# Altium footprint library WR-MJ.PcbLib: 101 footprints (part 2 of 7)
Each footprint in its own frame and in the unit in brackets; x right, y up, seen from the top. Pads: shape width x height; smd on the part's side, far side on the other; paste and mask are expansions set on the pad; w line width, h text height; cw(c..) or ccw(c..) is an arc to the next point about the centre after c.
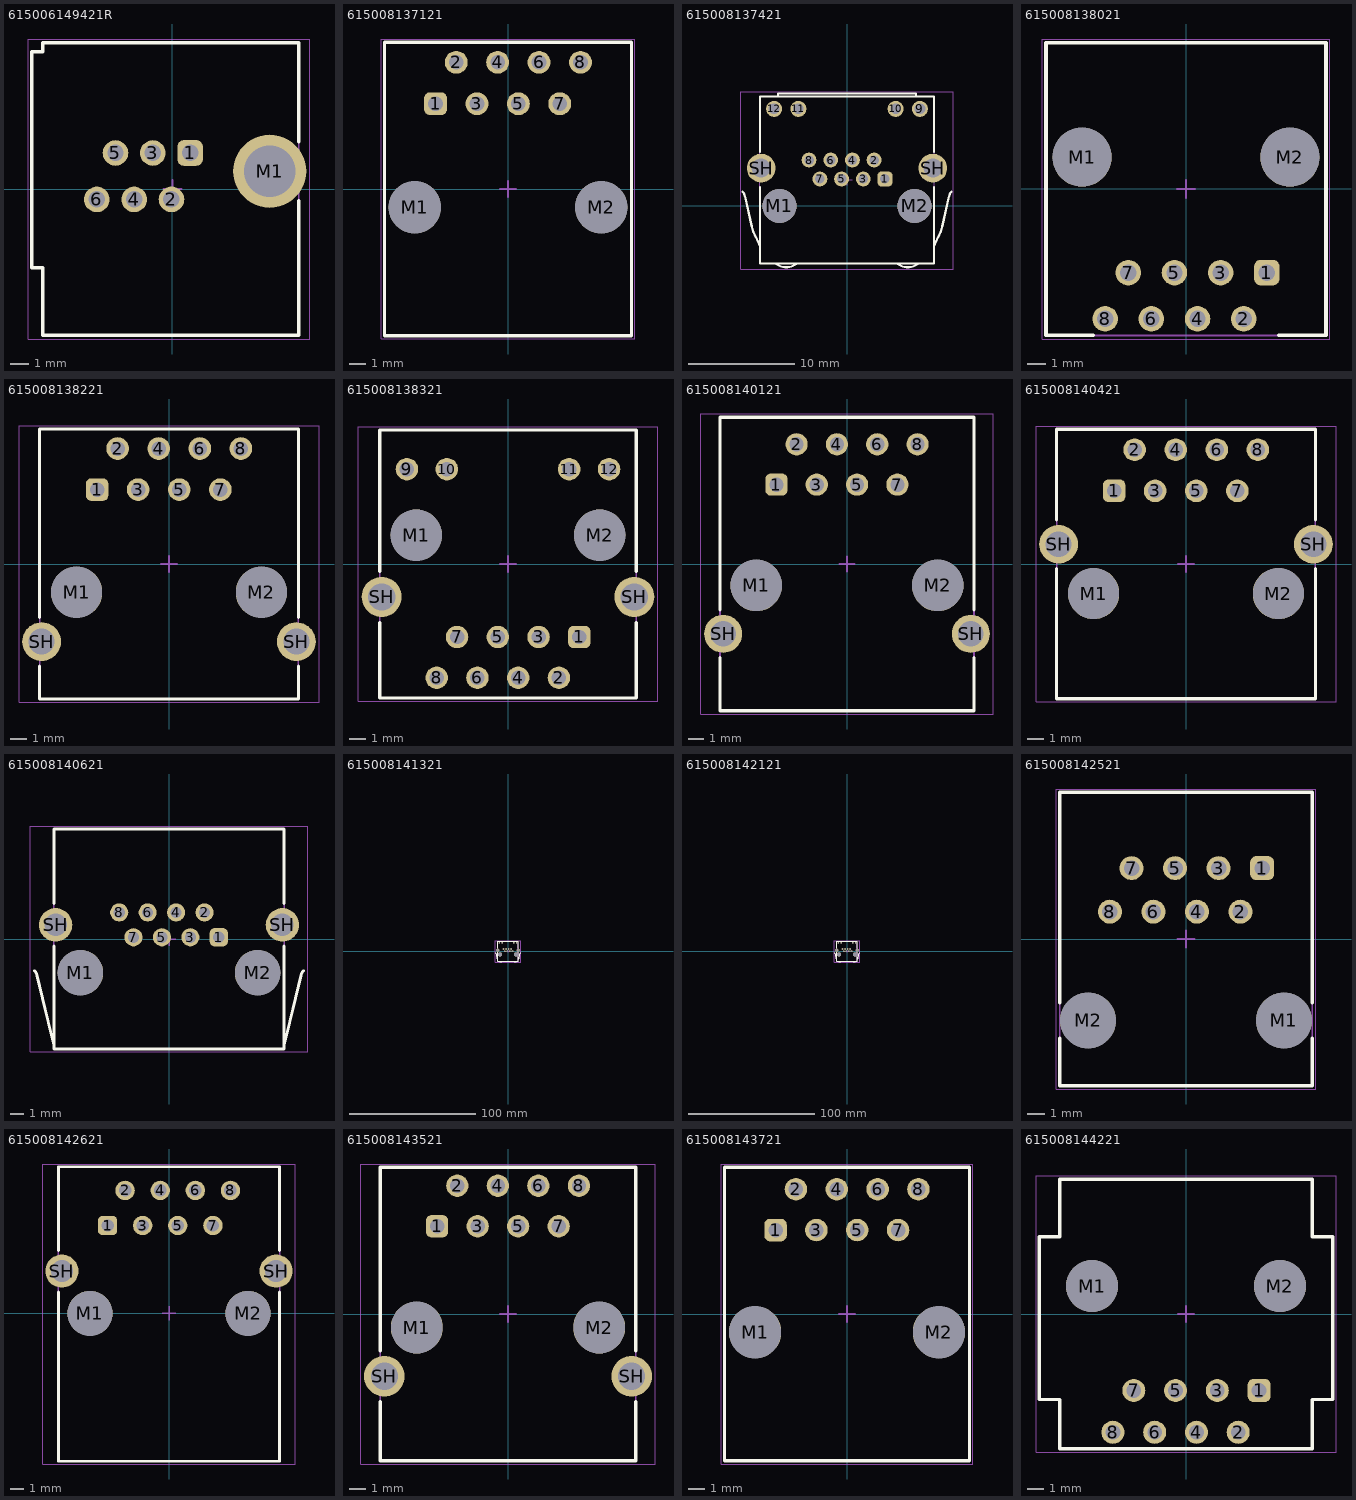
[diagram p1: the footprints below, top view; thin cyan lines are the x and y axes]

## 615006149421R [mm] "Modular Jack Horizontal Plastic 6P6C Assembly Tab Up"
height 15.4
pads (7):
  rrect50% 1.4x1.4 hole 0.9: 1(0.97,1.97)
  round 1.4 hole 0.9: 2(-0.05,-0.57) 3(-1.07,1.97) 4(-2.09,-0.57) 5(-3.11,1.97) 6(-4.13,-0.57)
  round 4 hole 2.8: M1(5.32,0.97)
Top Overlay:
  lines w0.2: 6.91,-0.65 6.91,-8 -7.09,-8 -7.09,-4.3 -7.69,-4.3 -7.69,7.5 -7.09,7.5 -7.09,8 6.91,8 6.91,2.6
Top Assembly:
  lines w0.1: -7.69,-4.3 -7.09,-4.3 -7.09,-8 6.91,-8 6.91,8 -7.09,8 -7.09,7.5 -7.69,7.5 -7.69,-4.3
Top Designator:
  text ".Designator" at -3.647,-0.357 h1
Top Courtyard:
  lines w0.05: -7.89,-8.2 7.52,-8.2 7.52,8.2 -7.89,8.2 -7.89,-8.2
Top Component Center:
  lines w0.1: -0.5,0 0.5,0 ; 0,-0.5 0,0.5
3D body "615006149421R.stp": height 15.5, standoff -3.29, extent -7.69,-8 6.91,8

## 615008137121 [mm] "Modular Jack THT Horizontal Plastic 8P8C Tab Down"
height 11.65
pads (10):
  rrect50% 1.4x1.4 hole 0.9: 1(-4.445,5.23)
  round 1.4 hole 0.9: 2(-3.175,7.77) 3(-1.905,5.23) 4(-0.635,7.77) 5(0.635,5.23) 6(1.905,7.77) 7(3.175,5.23) 8(4.445,7.77)
  round 3.2 hole 3.2 unplated: M1(-5.715,-1.12) M2(5.715,-1.12)
Top Overlay:
  lines w0.2: -7.575,-9 -7.575,9 7.575,9 7.575,-9 -7.575,-9
Top Assembly:
  lines w0.1: -7.575,-9 7.575,-9 7.575,9 -7.575,9 -7.575,-9
Top Designator:
  text ".Designator" at -3.647,-0.357 h1
Top Courtyard:
  lines w0.05: -7.775,-9.2 7.775,-9.2 7.775,9.2 -7.775,9.2 -7.775,-9.2
Top Component Center:
  lines w0.1: -0.5,0 0.5,0 ; 0,-0.5 0,0.5
3D body "615008137121.stp": height 11.75, standoff -3.97, extent -7.575,-9 7.575,9

## 615008137421 [mm] "Modular Jack Horizontal Shielded with LED and EMI Panel Finger 8P8C Tab Up"
height 13.25
pads (16):
  rrect50% 1.4x1.4 hole 0.9: 1(3.57,2.54)
  round 1.4 hole 0.9: 2(2.55,4.32) 3(1.53,2.54) 4(0.51,4.32) 5(-0.51,2.54) 6(-1.53,4.32) 7(-2.55,2.54) 8(-3.57,4.32)
  round 1.5 hole 1: 9(6.86,9.13) 10(4.57,9.13) 11(-4.57,9.13) 12(-6.86,9.13)
  round 3.2 hole 3.2 unplated: M1(-6.35,0) M2(6.35,0)
  round 2.7 hole 1.8: SH(-8.075,3.56) SH(8.075,3.56)
Top Overlay:
  lines w0.2: -9.822,1.333 cw(c-10.254,0.853) -9.612,0.927 -8.96,-1.93 ; -8.965,-1.898 ccw(c-6.01,-1.38) -8.57,-2.944 cw(c-11.108,-4.543) -8.2,-3.807 ; -8.2,1.76 -8.2,-5.4 8.2,-5.4 8.2,1.76 ; -8.2,5.1 -8.2,10.3 8.2,10.3 8.2,5.1 ; -6.738,-5.4 ccw(c-5.715,-4.17) -4.692,-5.4 ; -6.5,10.3 -6.5,10.58 6.5,10.58 6.5,10.3 ; 4.692,-5.4 ccw(c5.715,-4.17) 6.738,-5.4 ; 8.2,-3.807 cw(c11.108,-4.543) 8.57,-2.944 ccw(c6.01,-1.38) 8.965,-1.898 ; 8.96,-1.93 9.612,0.927 cw(c10.254,0.853) 9.822,1.333
Top Assembly:
  lines w0.1: -9.822,1.333 cw(c-10.254,0.853) -9.612,0.927 -8.96,-1.93 ; -8.965,-1.898 ccw(c-6.01,-1.38) -8.57,-2.944 cw(c-11.108,-4.543) -8.2,-3.807 ; -6.738,-5.4 ccw(c-5.715,-4.17) -4.692,-5.4 ; -6.5,10.3 -6.5,10.58 6.5,10.58 6.5,10.3 ; 4.692,-5.4 ccw(c5.715,-4.17) 6.738,-5.4 ; 8.2,-3.807 cw(c11.108,-4.543) 8.57,-2.944 ccw(c6.01,-1.38) 8.965,-1.898 ; 8.96,-1.93 9.612,0.927 cw(c10.254,0.853) 9.822,1.333 ; -8.2,-5.4 8.2,-5.4 8.2,10.3 -8.2,10.3 -8.2,-5.4
Top Designator:
  text ".Designator" at -3.647,-0.357 h1
Top Courtyard:
  lines w0.05: -10,-5.97 10,-5.97 10,10.735 -10,10.735 -10,-5.97
Top Component Center:
  lines w0.1: -0.5,2.45 0.5,2.45 ; 0,1.95 0,2.95
3D body "615008137421.stp": height 15.03, standoff -3.9, extent -9.825,-5.77 9.825,10.568

## 615008138021 [mm] "Modular Jack Vertical Plastic 8P8C"
height 16.4
pads (10):
  rrect50% 1.4x1.4 hole 0.9: 1(4.445,-4.6)
  round 1.4 hole 0.9: 2(3.175,-7.14) 3(1.905,-4.6) 4(0.635,-7.14) 5(-0.635,-4.6) 6(-1.905,-7.14) 7(-3.175,-4.6) 8(-4.445,-7.14)
  round 3.25 hole 3.25 unplated: M1(-5.715,1.75) M2(5.715,1.75)
Top Overlay:
  lines w0.2: -5.1,-8.05 -7.7,-8.05 -7.7,8.05 7.7,8.05 7.7,-8.05 5.1,-8.05
Top Assembly:
  lines w0.1: -7.7,-8.05 -7.7,8.05 7.7,8.05 7.7,-8.05 -7.7,-8.05
Top Designator:
  text ".Designator" at -3.647,-0.357 h1
Top Courtyard:
  lines w0.05: -7.9,-8.25 -7.9,8.25 7.9,8.25 7.9,-8.25 -7.9,-8.25
Top Component Center:
  lines w0.1: -0.5,0 0.5,0 ; 0,-0.5 0,0.5
3D body "615008138021.stp": height 16.35, standoff -3.45, extent -7.7,-8.05 7.7,8.05

## 615008138221 [mm] "Modular Jack Vertical Shielded 8P8C Front Post"
height 16.6
pads (12):
  rrect50% 1.4x1.4 hole 0.9: 1(-4.445,4.6)
  round 1.4 hole 0.9: 2(-3.175,7.14) 3(-1.905,4.6) 4(-0.635,7.14) 5(0.635,4.6) 6(1.905,7.14) 7(3.175,4.6) 8(4.445,7.14)
  round 3.17 hole 3.17 unplated: M1(-5.715,-1.75) M2(5.715,-1.75)
  round 2.4 hole 1.6: SH(-7.875,-4.8) SH(7.875,-4.8)
Top Overlay:
  lines w0.2: -8,-6.3 -8,-8.35 8,-8.35 8,-6.3 ; -8,-3.3 -8,8.35 8,8.35 8,-3.3
Top Assembly:
  lines w0.1: -8,-8.35 8,-8.35 8,8.35 -8,8.35 -8,-8.35
Top Designator:
  text ".Designator" at -3.647,-0.357 h1
Top Courtyard:
  lines w0.05: -9.275,-8.55 9.275,-8.55 9.275,8.55 -9.275,8.55 -9.275,-8.55
Top Component Center:
  lines w0.1: -0.5,0 0.5,0 ; 0,-0.5 0,0.5
3D body "615008138221 (rev1).stp": height 16.73, standoff -3.72, extent -8,-8.35 8,8.3

## 615008138321 [mm] "Modular Jack Vertical Shielded 8P8C with LED"
height 16.5
pads (16):
  rrect50% 1.4x1.4 hole 0.9: 1(4.445,-4.55)
  round 1.4 hole 0.9: 2(3.175,-7.09) 3(1.905,-4.55) 4(0.635,-7.09) 5(-0.635,-4.55) 6(-1.905,-7.09) 7(-3.175,-4.55) 8(-4.445,-7.09) 9(-6.3,5.91) 10(-3.81,5.91) 11(3.81,5.91) 12(6.3,5.91)
  round 3.2 hole 3.2 unplated: M1(-5.715,1.8) M2(5.715,1.8)
  round 2.5 hole 1.7: SH(-7.875,-2.05) SH(7.875,-2.05)
Top Overlay:
  lines w0.2: -8,-3.65 -8,-8.35 8,-8.35 8,-3.65 ; -8,-0.45 -8,8.35 8,8.35 8,-0.45
Top Assembly:
  lines w0.1: -8,-8.35 -8,8.35 8,8.35 8,-8.35 -8,-8.35
Top Designator:
  text ".Designator" at -3.647,-0.357 h1
Top Courtyard:
  lines w0.05: -9.35,-8.55 -9.35,8.55 9.35,8.55 9.35,-8.55 -9.35,-8.55
Top Component Center:
  lines w0.1: -0.5,0 0.5,0 ; 0,-0.5 0,0.5
3D body "615008138321 (rev1).stp": height 16.57, standoff -3.93, extent -8.025,-8.35 8.025,8.35

## 615008140121 [mm] "Modular Jack Horizontal Shielded 8P8C Tab Down"
height 11.85
pads (12):
  rrect50% 1.4x1.4 hole 0.9: 1(-4.445,5)
  round 1.4 hole 0.9: 2(-3.175,7.54) 3(-1.905,5) 4(-0.635,7.54) 5(0.635,5) 6(1.905,7.54) 7(3.175,5) 8(4.445,7.54)
  round 3.25 hole 3.25 unplated: M1(-5.715,-1.35) M2(5.715,-1.35)
  round 2.4 hole 1.6: SH(-7.8,-4.4) SH(7.8,-4.4)
Top Overlay:
  lines w0.2: -8,-5.9 -8,-9.25 8,-9.25 8,-5.9 ; -8,-2.9 -8,9.25 8,9.25 8,-2.9
Top Assembly:
  lines w0.1: -8,-9.25 -8,9.25 8,9.25 8,-9.25 -8,-9.25
Top Designator:
  text ".Designator" at -3.647,-0.357 h1
Top Courtyard:
  lines w0.05: -9.2,-9.45 -9.2,9.45 9.2,9.45 9.2,-9.45 -9.2,-9.45
Top Component Center:
  lines w0.1: -0.5,0 0.5,0 ; 0,-0.5 0,0.5
3D body "615008140121.stp": height 12.56, standoff -3.19, extent -8,-9.25 8,9.3

## 615008140421 [mm] "Modular Jack Vertical Shielded 8P8C Rear Post"
height 16.6
pads (12):
  rrect50% 1.4x1.4 hole 0.9: 1(-4.445,4.524)
  round 1.4 hole 0.9: 2(-3.175,7.064) 3(-1.905,4.524) 4(-0.635,7.064) 5(0.635,4.524) 6(1.905,7.064) 7(3.175,4.524) 8(4.445,7.064)
  round 3.17 hole 3.17 unplated: M1(-5.715,-1.826) M2(5.715,-1.826)
  round 2.4 hole 1.6: SH(-7.875,1.224) SH(7.875,1.224)
Top Overlay:
  lines w0.2: -8,-0.275 -8,-8.325 8,-8.325 8,-0.275 ; -8,2.723 -8,8.325 8,8.325 8,2.723
Top Assembly:
  lines w0.1: -8,-8.325 -8,8.325 8,8.325 8,-8.325 -8,-8.325
Top Designator:
  text ".Designator" at -3.647,-0.357 h1
Top Courtyard:
  lines w0.05: -9.275,-8.525 9.275,-8.525 9.275,8.525 -9.275,8.525 -9.275,-8.525
Top Component Center:
  lines w0.1: -0.5,0 0.5,0 ; 0,-0.5 0,0.5
3D body "615008140421 (rev1).stp": height 16.65, standoff -3.55, extent -8,-8.325 8,8.325

## 615008140621 [mm] "Modular Jack Horizontal Shielded with EMI Panel Finger 8P8C Tab Up"
height 13.25
pads (12):
  rrect50% 1.3x1.3 hole 0.8: 1(3.57,0.125)
  round 1.3 hole 0.8: 2(2.55,1.905) 3(1.53,0.125) 4(0.51,1.905) 5(-0.51,0.125) 6(-1.53,1.905) 7(-2.55,0.125) 8(-3.57,1.905)
  round 3.25 hole 3.25 unplated: M1(-6.35,-2.415) M2(6.35,-2.415)
  round 2.4 hole 1.6: SH(-8.125,1.015) SH(8.125,1.015)
Top Overlay:
  lines w0.2: -9.64,-2.27 cw(c-10.1,-2.729) -9.462,-2.609 -8.25,-7.58 ; -8.25,-0.5 -8.25,-7.875 8.25,-7.875 8.25,-0.5 ; -8.25,2.55 -8.25,7.875 8.25,7.875 8.25,2.55 ; 8.25,-7.58 9.462,-2.609 cw(c10.1,-2.729) 9.64,-2.27
Top Assembly:
  lines w0.1: -9.64,-2.27 cw(c-10.1,-2.729) -9.462,-2.609 -8.25,-7.58 ; 8.25,-7.58 9.462,-2.609 cw(c10.1,-2.729) 9.64,-2.27 ; -8.25,-7.875 -8.25,7.875 8.25,7.875 8.25,-7.875 -8.25,-7.875
Top Designator:
  text ".Designator" at -3.647,-0.357 h1
Top Courtyard:
  lines w0.05: -9.95,-8.075 -9.95,8.075 9.95,8.075 9.95,-8.075 -9.95,-8.075
Top Component Center:
  lines w0.1: -0.5,0 0.5,0 ; 0,-0.5 0,0.5
3D body "615008140621 (rev1).stp": height 14.82, standoff -3.42, extent -9.75,-7.875 9.75,7.975

## 615008141321 [mm] "Modular Jack Horizontal Shielded with LED and EMI Panel Finger 8P8C Tab Up"
height 13.25
pads (16):
  rrect50% 1.3x1.3 hole 0.8: 1(3.57,0.125)
  round 1.3 hole 0.8: 2(2.55,1.905) 3(1.53,0.125) 4(0.51,1.905) 5(-0.51,0.125) 6(-1.53,1.905) 7(-2.55,0.125) 8(-3.57,1.905) 9(6.86,6.725) 10(4.57,6.725) 11(-4.57,6.725) 12(-6.86,6.725)
  round 3.25 hole 3.25 unplated: M1(-6.35,-2.415) M2(6.35,-2.415)
  round 2.5 hole 1.7: SH(-8.125,1.015) SH(8.125,1.015)
Top Overlay:
  lines w0.2: -9.795,-1.045 cw(c-10.325,-1.565) -9.589,-1.46 ccw(c54.385,9.851) -8.911,-4.786 ccw(c30.346,12.141) -8.542,-5.618 cw(c-11.997,-7.419) -8.25,-6.35 ; -8.25,-0.55 -8.25,-7.875 8.25,-7.875 8.25,-0.55 ; -8.25,2.6 -8.25,7.875 8.25,7.875 8.25,2.6 ; -6.918,-7.874 ccw(c-5.71,-6.351) -4.503,-7.874 ; 4.503,-7.874 ccw(c5.71,-6.351) 6.918,-7.874 ; 8.25,-6.35 cw(c11.997,-7.419) 8.542,-5.618 ccw(c-30.346,12.141) 8.911,-4.786 ccw(c-54.385,9.851) 9.589,-1.46 cw(c10.325,-1.565) 9.795,-1.045
Top Assembly:
  lines w0.1: -9.795,-1.045 cw(c-10.325,-1.565) -9.589,-1.46 ccw(c54.385,9.851) -8.911,-4.786 ccw(c30.346,12.141) -8.542,-5.618 cw(c-11.997,-7.419) -8.25,-6.35 ; -6.918,-7.874 ccw(c-5.71,-6.351) -4.503,-7.874 ; 4.503,-7.874 ccw(c5.71,-6.351) 6.918,-7.874 ; 8.25,-6.35 cw(c11.997,-7.419) 8.542,-5.618 ccw(c-30.346,12.141) 8.911,-4.786 ccw(c-54.385,9.851) 9.589,-1.46 cw(c10.325,-1.565) 9.795,-1.045 ; -8.25,-7.875 -8.25,7.875 8.25,7.875 8.25,-7.875 -8.25,-7.875
Top Designator:
  text ".Designator" at -3.647,-0.357 h1
Top Courtyard:
  lines w0.05: -10,-8.52 10,-8.52 10,8.32 -10,8.32 -10,-8.52
Top Component Center:
  lines w0.1: -0.5,0 0.5,0 ; 0,-0.5 0,0.5
3D body "615008141321 (rev1).stp": height 15.13, standoff -3.31, extent -9.875,-8.33 9.875,8.12

## 615008142121 [mm] "Modular Jack Horizontal Shielded with LED and EMI Panel Finger 8P8C Tab Up"
height 13.25
pads (16):
  rrect50% 1.3x1.3 hole 0.8: 1(3.57,0.125)
  round 1.3 hole 0.8: 2(2.55,1.905) 3(1.53,0.125) 4(0.51,1.905) 5(-0.51,0.125) 6(-1.53,1.905) 7(-2.55,0.125) 8(-3.57,1.905) 9(6.86,6.725) 10(4.57,6.725) 11(-4.57,6.725) 12(-6.86,6.725)
  round 3.25 hole 3.25 unplated: M1(-6.35,-2.415) M2(6.35,-2.415)
  round 2.5 hole 1.7: SH(-8.125,1.015) SH(8.125,1.015)
Top Overlay:
  lines w0.2: -9.795,-1.045 cw(c-10.325,-1.565) -9.589,-1.46 ccw(c54.385,9.851) -8.911,-4.786 ccw(c30.346,12.141) -8.542,-5.618 cw(c-11.997,-7.419) -8.25,-6.35 ; -8.25,-0.55 -8.25,-7.875 8.25,-7.875 8.25,-0.55 ; -8.25,2.6 -8.25,7.875 8.25,7.875 8.25,2.6 ; -6.918,-7.874 ccw(c-5.71,-6.351) -4.503,-7.874 ; 4.503,-7.874 ccw(c5.71,-6.351) 6.918,-7.874 ; 8.25,-6.35 cw(c11.997,-7.419) 8.542,-5.618 ccw(c-30.346,12.141) 8.911,-4.786 ccw(c-54.385,9.851) 9.589,-1.46 cw(c10.325,-1.565) 9.795,-1.045
Top Assembly:
  lines w0.1: -9.795,-1.045 cw(c-10.325,-1.565) -9.589,-1.46 ccw(c54.385,9.851) -8.911,-4.786 ccw(c30.346,12.141) -8.542,-5.618 cw(c-11.997,-7.419) -8.25,-6.35 ; -6.918,-7.874 ccw(c-5.71,-6.351) -4.503,-7.874 ; 4.503,-7.874 ccw(c5.71,-6.351) 6.918,-7.874 ; 8.25,-6.35 cw(c11.997,-7.419) 8.542,-5.618 ccw(c-30.346,12.141) 8.911,-4.786 ccw(c-54.385,9.851) 9.589,-1.46 cw(c10.325,-1.565) 9.795,-1.045 ; -8.25,-7.875 8.25,-7.875 8.25,7.875 -8.25,7.875 -8.25,-7.875
Top Designator:
  text ".Designator" at -3.647,-0.357 h1
Top Courtyard:
  lines w0.05: -10,-8.52 -10,8.32 10,8.32 10,-8.52 -10,-8.52
Top Component Center:
  lines w0.1: -0.5,0 0.5,0 ; 0,-0.5 0,0.5
3D body "615008142121.stp": height 15.13, standoff -3.31, extent -9.875,-8.33 9.875,8.12

## 615008142521 [mm] "Modular Jack 45deg Plastic 8P8C"
height 20.4
pads (10):
  rrect50% 1.4x1.4 hole 0.9: 1(4.44,4.135)
  round 1.4 hole 0.9: 2(3.175,1.595) 3(1.905,4.135) 4(0.635,1.595) 5(-0.635,4.135) 6(-1.905,1.595) 7(-3.175,4.135) 8(-4.44,1.595)
  round 3.25 hole 3.25 unplated: M1(5.715,-4.755) M2(-5.715,-4.755)
Top Overlay:
  lines w0.2: -7.375,-5.8 -7.375,-8.555 7.375,-8.555 7.375,-5.8 ; -7.375,-3.71 -7.375,8.555 7.375,8.555 7.375,-3.71
Top Assembly:
  lines w0.1: -7.375,-8.555 7.375,-8.555 7.375,8.555 -7.375,8.555 -7.375,-8.555
Top Designator:
  text ".Designator" at -3.647,-0.357 h1
Top Courtyard:
  lines w0.05: -7.575,-8.755 7.575,-8.755 7.575,8.755 -7.575,8.755 -7.575,-8.755
Top Component Center:
  lines w0.1: -0.5,0 0.5,0 ; 0,-0.5 0,0.5
3D body "615008142521.stp": height 20.47, standoff -3.23, extent -7.375,-8.555 7.375,8.555

## 615008142621 [mm] "Modular Jack Horizontal Shielded Rear Grounding Post 8P8C Tab Down"
height 13.3
pads (12):
  rrect50% 1.4x1.4 hole 0.9: 1(-4.445,6.35)
  round 1.4 hole 0.9: 2(-3.175,8.89) 3(-1.905,6.35) 4(-0.635,8.89) 5(0.635,6.35) 6(1.905,8.89) 7(3.175,6.35) 8(4.445,8.89)
  round 3.25 hole 3.25 unplated: M1(-5.715,0) M2(5.715,0)
  round 2.4 hole 1.6: SH(-7.75,3.05) SH(7.75,3.05)
Top Overlay:
  lines w0.2: -8,1.55 -8,-10.7 8,-10.7 8,1.55 ; -8,4.55 -8,10.6 8,10.6 8,4.55
Top Assembly:
  lines w0.1: -8,-10.7 -8,10.6 8,10.6 8,-10.7 -8,-10.7
Top Designator:
  text ".Designator" at -3.647,-0.357 h1
Top Courtyard:
  lines w0.05: -9.15,-10.9 9.15,-10.9 9.15,10.8 -9.15,10.8 -9.15,-10.9
Top Component Center:
  lines w0.1: -0.5,0 0.5,0 ; 0,-0.5 0,0.5
3D body "615008142621.stp": height 13.65, standoff -3.45, extent -8,-10.7 8,10.6

## 615008143521 [mm] "Modular Jack Horizontal Half Shielded 8P8C Tab Down"
height 13.1
pads (12):
  rrect50% 1.4x1.4 hole 0.9: 1(-4.445,5.5)
  round 1.4 hole 0.9: 2(-3.175,8.04) 3(-1.905,5.5) 4(-0.635,8.04) 5(0.635,5.5) 6(1.905,8.04) 7(3.175,5.5) 8(4.445,8.04)
  round 3.25 hole 3.25 unplated: M1(-5.715,-0.85) M2(5.715,-0.85)
  round 2.55 hole 1.7: SH(-7.75,-3.9) SH(7.75,-3.9)
Top Overlay:
  lines w0.2: -8,-5.5 -8,-9.2 8,-9.2 8,-5.5 ; -8,-2.3 -8,9.2 8,9.2 8,-2.3
Top Assembly:
  lines w0.1: -8,-9.2 8,-9.2 8,9.2 -8,9.2 -8,-9.2
Top Designator:
  text ".Designator" at -3.647,-0.357 h1
Top Courtyard:
  lines w0.05: -9.225,-9.4 9.225,-9.4 9.225,9.4 -9.225,9.4 -9.225,-9.4
Top Component Center:
  lines w0.1: -0.5,0 0.5,0 ; 0,-0.5 0,0.5
3D body "615008143521.stp": height 13.25, standoff -3.98, extent -8.9,-9.2 8.9,9.2

## 615008143721 [mm] "Modular Jack Horizontal Plastic 8P8C Tab Down"
height 12.6
pads (10):
  rrect50% 1.4x1.4 hole 0.9: 1(-4.445,5.22)
  round 1.4 hole 0.9: 2(-3.175,7.76) 3(-1.905,5.22) 4(-0.635,7.76) 5(0.635,5.22) 6(1.905,7.76) 7(3.175,5.22) 8(4.445,7.76)
  round 3.25 hole 3.25 unplated: M1(-5.715,-1.13) M2(5.715,-1.13)
Top Overlay:
  lines w0.2: -7.62,-9.13 -7.62,9.13 7.62,9.13 7.62,-9.13 -7.62,-9.13
Top Assembly:
  lines w0.1: -7.62,-9.13 -7.62,9.13 7.62,9.13 7.62,-9.13 -7.62,-9.13
Top Designator:
  text ".Designator" at -3.647,-0.357 h1
Top Courtyard:
  lines w0.05: -7.82,-9.33 -7.82,9.33 7.82,9.33 7.82,-9.33 -7.82,-9.33
Top Component Center:
  lines w0.1: -0.5,0 0.5,0 ; 0,-0.5 0,0.5
3D body "615008143721 (rev1).stp": height 12.7, standoff -3.8, extent -7.62,-9.13 7.62,9.13

## 615008144221 [mm] "Modular Jack Vertical Plastic 8P8C with Ears"
height 16.38
pads (10):
  rrect50% 1.4x1.4 hole 0.9: 1(4.445,-4.65)
  round 1.4 hole 0.9: 2(3.175,-7.19) 3(1.905,-4.65) 4(0.635,-7.19) 5(-0.635,-4.65) 6(-1.905,-7.19) 7(-3.175,-4.65) 8(-4.445,-7.19)
  round 3.17 hole 3.17 unplated: M1(-5.715,1.7) M2(5.715,1.7)
Top Overlay:
  lines w0.2: -8.92,-5.2 -8.92,4.7 -7.68,4.7 -7.68,8.2 7.68,8.2 7.68,4.7 8.92,4.7 8.92,-5.2 7.68,-5.2 7.68,-8.2 -7.68,-8.2 -7.68,-5.2 -8.92,-5.2
Top Assembly:
  lines w0.1: -8.92,-5.2 -7.68,-5.2 -7.68,-8.2 7.68,-8.2 7.68,-5.2 8.92,-5.2 8.92,4.7 7.68,4.7 7.68,8.2 -7.68,8.2 -7.68,4.7 -8.92,4.7 -8.92,-5.2
Top Designator:
  text ".Designator" at -3.647,-0.357 h1
Top Courtyard:
  lines w0.05: -9.12,-8.4 9.12,-8.4 9.12,8.4 -9.12,8.4 -9.12,-8.4
Top Component Center:
  lines w0.1: -0.5,0 0.5,0 ; 0,-0.5 0,0.5
3D body "615008144221.stp": height 16.5, standoff -3.5, extent -8.92,-8.2 8.92,8.2